# Altium footprint library Clema_IND.PcbLib: 3 footprints
Each footprint in its own frame and in the unit in brackets; x right, y up, seen from the top. Pads: shape width x height; smd on the part's side, far side on the other; paste and mask are expansions set on the pad; w line width, h text height; cw(c..) or ccw(c..) is an arc to the next point about the centre after c.
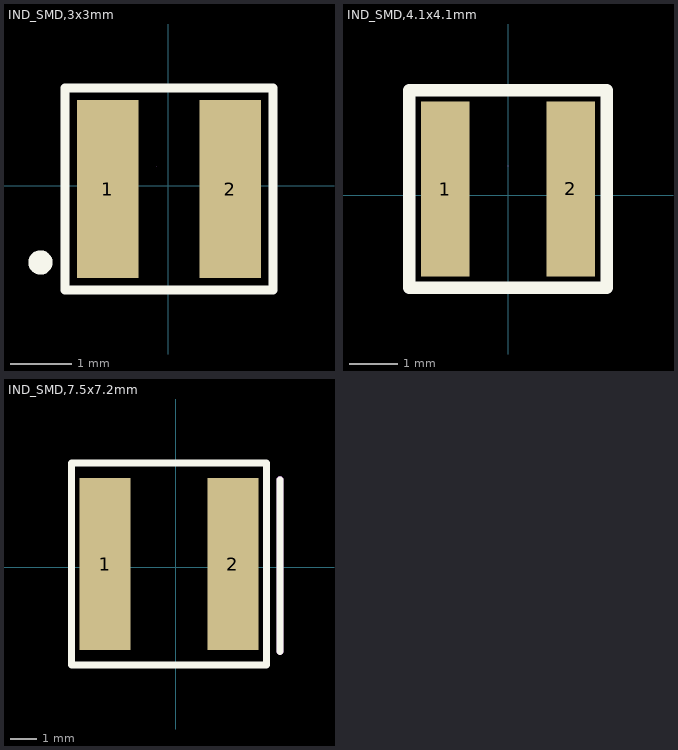
[diagram p0: the footprints below, top view; thin cyan lines are the x and y axes]

## IND_SMD,3x3mm [mm]
pads (2):
  rect 1x2.9 smd paste+0 mask+0.051: 1(-0.988,-0.052) 2(1.012,-0.052)
Top Overlay:
  circle w0.254: c-2.088,-1.252 r0.071
  lines w0.152: -1.688,-1.702 -1.688,1.598 1.712,1.598 1.712,-1.702 -1.688,-1.702
Mechanical 15:
  lines w0.003: -0.186,0.323 -0.185,0.323
3D body "ind d.stp": height 2, standoff 0, extent -1.484,-1.562 1.516,1.448

## IND_SMD,4.1x4.1mm [mm]
pads (2):
  rect 1x3.6 smd paste+0 mask+0.05: 1(-1.29,0.127) 2(1.29,0.127)
Top Overlay:
  lines w0.254: -2.032,-1.905 2.032,-1.905 2.032,2.159 -2.032,2.159 -2.032,-1.905
Mechanical 15:
  lines w0.003: 0,0.611 0,0.611

## IND_SMD,7.5x7.2mm [mm]
pads (2):
  rect 1.92x6.5 smd paste+0 mask+0.05: 1(-2.664,0.127) 2(2.156,0.127)
Top Overlay:
  lines w0.254: 3.937,-3.175 3.937,3.302 ; -3.937,-3.683 3.429,-3.683 3.429,3.937 -3.937,3.937 -3.937,-3.683
Mechanical 15:
  region: 4.064,3.302 4.064,-3.175 4.064,-3.228 3.99,-3.302 3.884,-3.302 3.81,-3.228 3.81,-3.175 3.81,3.302 3.81,3.355 3.884,3.429 3.99,3.429 4.064,3.355 4.064,3.302
3D body "XAL7070-332MEB--3DModel-STEP-56544.STEP": height 7.08, standoff 0.08, extent -3.727,-3.563 3.473,3.937